# Altium schematic symbol library IS31FL3254-QFLS4-TR.SchLib: 1 symbol
Pins are listed as number, name and electrical type; pins without a type are passive.

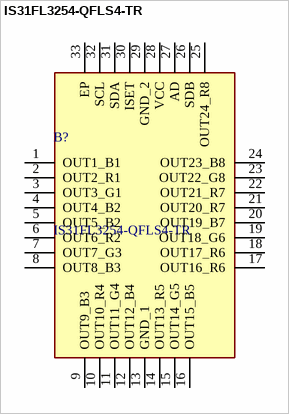
[diagram p0: symbol IS31FL3254-QFLS4-TR]

## IS31FL3254-QFLS4-TR
designator B?
24-CHANNEL LED DRIVER, QFN-32, 4mm4mm, T&R; Manufacturer_Name: Lumissil Microsystems; Geometry.Height: 0.8mm; Manufacturer_Part_Number: IS31FL3254-QFLS4-TR; Mouser Part Number: *; Mouser Price/Stock: *; Arrow Part Number: IS31FL3254-QFLS4-TR; Arrow Price/Stock: https://www.arrow.com/en/products/is31fl3254-qfls4-tr/lumissil-microsystems.html?utm_currency=USD&region=nac; Datasheet Link: https://www.lumissil.com/assets/pdf/core/IS31FL3254_DS.pdf
footprint QFN40P400X400X80-33N-D
pins: 1 OUT1_B1, 2 OUT2_R1, 3 OUT3_G1, 4 OUT4_B2, 5 OUT5_B2, 6 OUT6_R2, 7 OUT7_G3, 8 OUT8_B3, 9 OUT9_B3, 10 OUT10_R4, 11 OUT11_G4, 12 OUT12_B4, 13 GND_1, 14 OUT13_R5, 15 OUT14_G5, 16 OUT15_B5, 17 OUT16_R6, 18 OUT17_R6, 19 OUT18_G6, 20 OUT19_B7, 21 OUT20_R7, 22 OUT21_R7, 23 OUT22_G8, 24 OUT23_B8, 25 OUT24_R8, 26 SDB, 27 AD, 28 VCC, 29 GND_2, 30 ISET, 31 SDA, 32 SCL, 33 EP